# Altium footprint library SamacSys.PcbLib: 16 footprints
Each footprint in its own frame and in the unit in brackets; x right, y up, seen from the top. Pads: shape width x height; smd on the part's side, far side on the other; paste and mask are expansions set on the pad; w line width, h text height; cw(c..) or ccw(c..) is an arc to the next point about the centre after c.
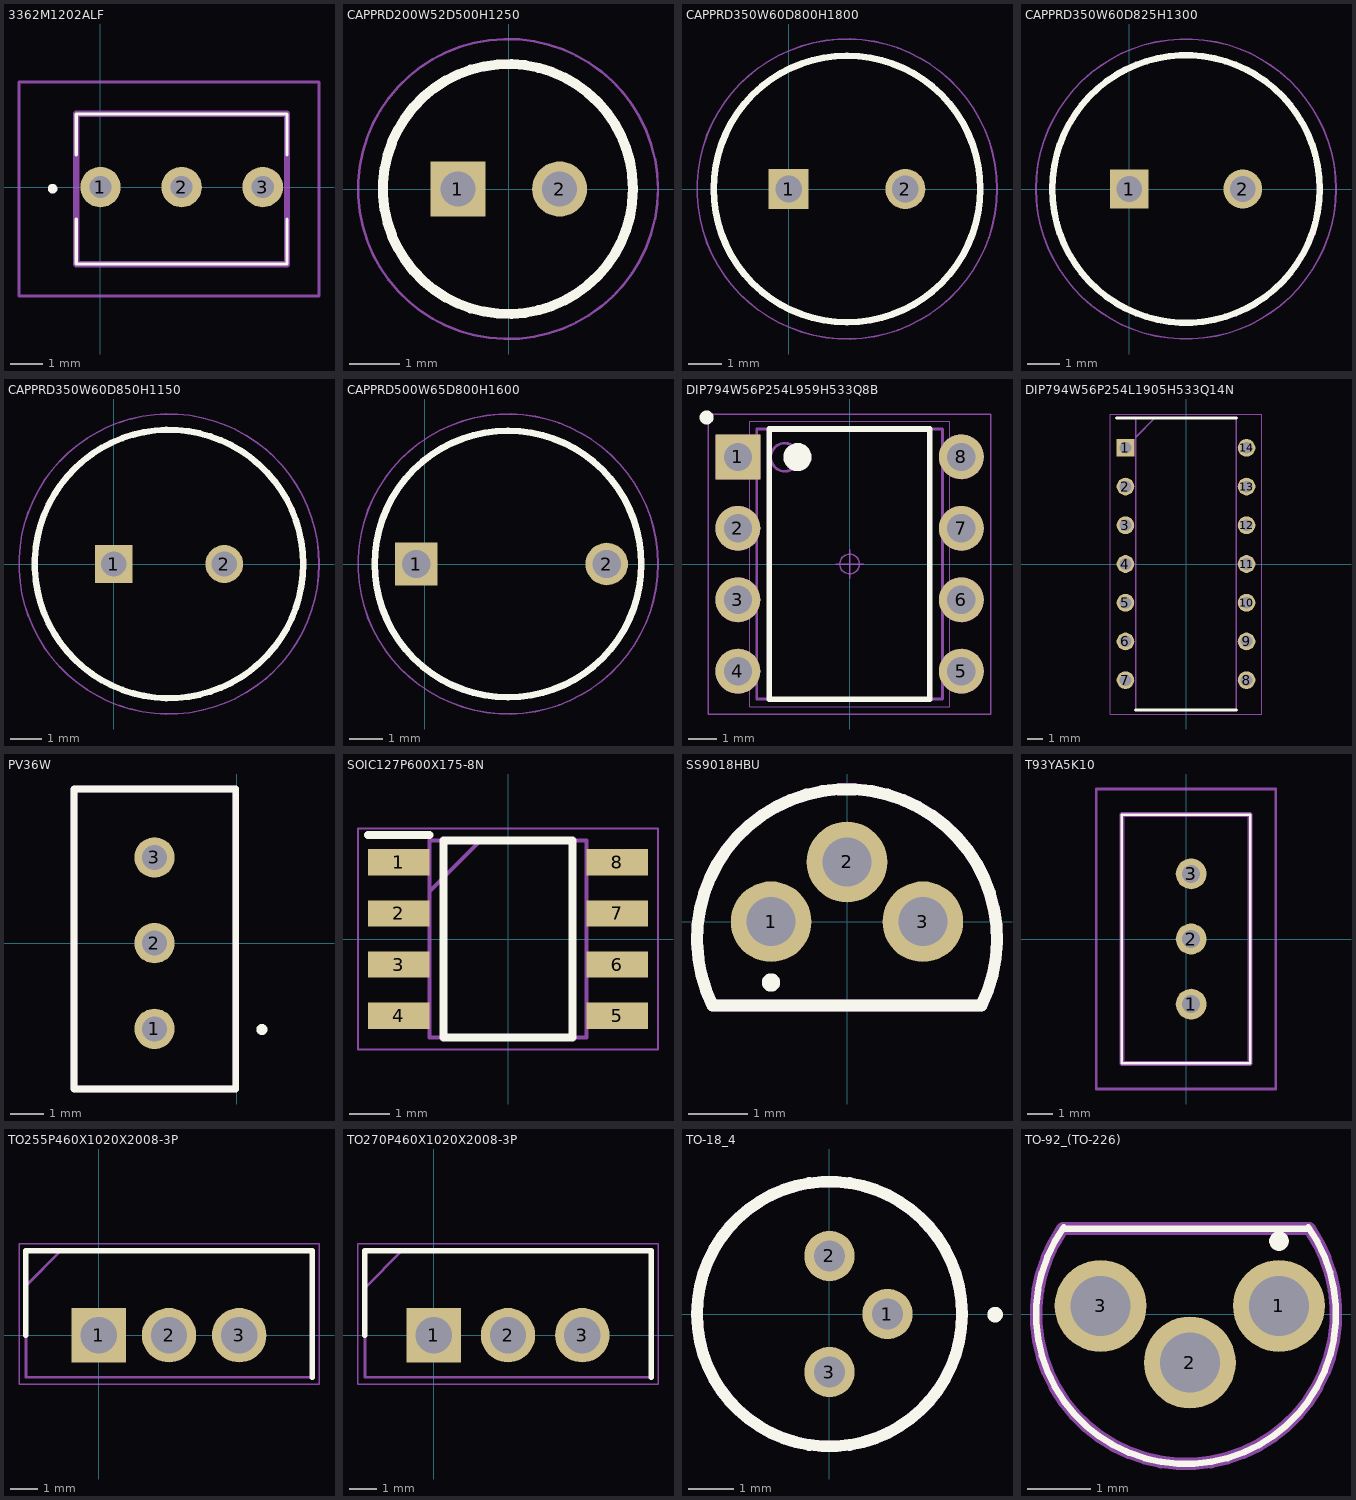
[diagram p0: the footprints below, top view; thin cyan lines are the x and y axes]

## 3362M1202ALF [mm]
pads (3):
  round 1.265 hole 0.69: 1(0,0) 2(2.54,0) 3(5.08,0)
Top Overlay:
  lines w0.1: -0.76,-1 -0.76,-2.41 5.84,-2.41 5.84,-1 ; -0.76,1 -0.76,2.29 5.84,2.29 5.84,1
  lines w0.2: -1.5,-0.1 cw(c-1.5,-0.05) -1.5,0 ; -1.5,-0.1 ccw(c-1.5,-0.05) -1.5,0 ; -1.5,-0.1 cw(c-1.5,-0.05) -1.5,0
Mechanical 13:
  lines w0.2: -0.76,-2.41 5.84,-2.41 5.84,2.29 -0.76,2.29 -0.76,-2.41
Mechanical 15:
  lines w0.1: -2.55,-3.41 6.84,-3.41 6.84,3.29 -2.55,3.29 -2.55,-3.41
3D body "3362M-1-202ALF.stp": height 4.8, standoff -5, extent -0.76,-2.41 5.84,2.29

## CAPPRD200W52D500H1250 [mm]
pads (2):
  rect 1.1x1.1 hole 0.7: 1(-1.016,0)
  round 1.1 hole 0.7: 2(1.016,0)
Top Overlay:
  circle w0.2: c-0.016,0 r2.5
Mechanical 13:
  circle w0.1: c-0.016,0 r2.5
Mechanical 15:
  circle w0.05: c-0.016,0 r3
3D body "860010672005.stp": height 12.5, standoff -10, extent -2.766,-2.75 2.734,2.75

## CAPPRD350W60D800H1800 [mm]
pads (2):
  rect 1.2x1.2 hole 0.8: 1(0,0)
  round 1.2 hole 0.8: 2(3.5,0)
Top Overlay:
  circle w0.2: c1.75,0 r4
Mechanical 13:
  circle w0.1: c1.75,0 r4
Mechanical 15:
  circle w0.05: c1.75,0 r4.5
3D body "ESL227M035AG8AA.stp": height 18, standoff -10, extent -2.5,-4.25 6,4.25

## CAPPRD350W60D825H1300 [mm]
pads (2):
  rect 1.2x1.2 hole 0.8: 1(0,0)
  round 1.2 hole 0.8: 2(3.5,0)
Top Overlay:
  circle w0.2: c1.75,0 r4.125
Mechanical 13:
  circle w0.1: c1.75,0 r4.125
Mechanical 15:
  circle w0.05: c1.75,0 r4.625
3D body "ESMG500ELL101MHB5D.stp": height 13, standoff -10, extent -2.5,-4.25 6,4.25

## CAPPRD350W60D850H1150 [mm]
pads (2):
  rect 1.2x1.2 hole 0.8: 1(0,0)
  round 1.2 hole 0.8: 2(3.5,0)
Top Overlay:
  circle w0.2: c1.75,0 r4.25
Mechanical 13:
  circle w0.1: c1.75,0 r4.25
Mechanical 15:
  circle w0.05: c1.75,0 r4.75
3D body "ECA1HM101.stp": height 11.5, standoff -10, extent -2.75,-4.5 6.25,4.5

## CAPPRD500W65D800H1600 [mm]
pads (2):
  rect 1.275x1.275 hole 0.85: 1(-0.254,0)
  round 1.275 hole 0.85: 2(5.461,0)
Top Overlay:
  circle w0.2: c2.5,0 r4
Mechanical 13:
  circle w0.1: c2.5,0 r4
Mechanical 15:
  circle w0.05: c2.5,0 r4.5
3D body "EEU-FC1J101L.stp": height 16, standoff -10, extent -1.75,-4.25 6.75,4.25

## DIP794W56P254L959H533Q8B [mm]
pads (8):
  rect 1.6x1.6 hole 1: 1(-3.97,3.81)
  round 1.6 hole 1: 2(-3.97,1.27) 3(-3.97,-1.27) 4(-3.97,-3.81) 5(3.97,-3.81) 6(3.97,-1.27) 7(3.97,1.27) 8(3.97,3.81)
Top Overlay:
  circle w0.5: c-1.85,3.8 r0.25
  circle w0.25: c-5.08,5.207 r0.125
  lines w0.2: -2.85,-4.8 2.85,-4.8 2.85,4.8 -2.85,4.8 -2.85,-4.8
Mechanical 13:
  circle w0.1: c-2.302,3.795 r0.5
  circle w0.1: c-3.97,1.27 r0.75
  circle w0.1: c-3.97,-1.27 r0.75
  circle w0.1: c-3.97,-3.81 r0.75
  circle w0.1: c3.97,-3.81 r0.75
  circle w0.1: c3.97,-1.27 r0.75
  circle w0.1: c3.97,1.27 r0.75
  circle w0.1: c3.97,3.81 r0.75
  lines w0.1: -4.72,3.06 -4.72,4.56 -3.22,4.56 -3.22,3.06 -4.72,3.06 ; -3.302,-4.795 3.302,-4.795 3.302,4.795 -3.302,4.795 -3.302,-4.795
Mechanical 15:
  circle w0.05: c0,0 r0.35
  lines w0.001: -3.555,-5.08 3.555,-5.08 3.555,5.08 -3.555,5.08 -3.555,-5.08
  lines w0.05: -0.5,0 0.5,0 ; 0,-0.5 0,0.5 ; -5.02,-5.33 5.02,-5.33 5.02,5.33 -5.02,5.33 -5.02,-5.33
3D body "UC3843BNG.stp": height 5.33, standoff -3.5, extent -4.11,-4.795 4.11,4.795

## DIP794W56P254L1905H533Q14N [mm]
pads (14):
  rect 1.159x1.159 hole 0.759: 1(-3.969,7.62)
  round 1.159 hole 0.759: 2(-3.969,5.08) 3(-3.969,2.54) 4(-3.969,0) 5(-3.969,-2.54) 6(-3.969,-5.08) 7(-3.969,-7.62) 8(3.969,-7.62) 9(3.969,-5.08) 10(3.969,-2.54) 11(3.969,0) 12(3.969,2.54) 13(3.969,5.08) 14(3.969,7.62)
Top Overlay:
  lines w0.2: -4.548,9.588 3.302,9.588 ; -3.302,-9.588 3.302,-9.588
Mechanical 13:
  lines w0.1: -3.302,8.318 -2.032,9.588 ; -3.302,-9.588 3.302,-9.588 3.302,9.588 -3.302,9.588 -3.302,-9.588
Mechanical 15:
  lines w0.05: -4.957,-9.838 4.957,-9.838 4.957,9.838 -4.957,9.838 -4.957,-9.838
3D body "LMC6484IN.stp": height 5.33, standoff -3.5, extent -4.109,-9.525 4.109,9.525

## PV36W [mm]
pads (3):
  round 1.2 hole 0.74: 1(-2.441,-2.54) 2(-2.441,0) 3(-2.441,2.54)
Top Overlay:
  circle w0.2: c0.743,-2.561 r0.065
  lines w0.2: -4.83,-4.324 -0.031,-4.324 -0.031,4.57 -4.83,4.57 -4.83,-4.324
Mechanical 13:
  lines w0.2: -4.83,-4.324 -4.83,4.57 -0.031,4.57 -0.031,-4.324 -4.83,-4.324

## SOIC127P600X175-8N [mm]
pads (8):
  rect 1.525x0.65 smd: 1(-2.712,1.905) 2(-2.712,0.635) 3(-2.712,-0.635) 4(-2.712,-1.905) 5(2.712,-1.905) 6(2.712,-0.635) 7(2.712,0.635) 8(2.712,1.905)
Top Overlay:
  lines w0.2: -3.475,2.58 -1.95,2.58 ; -1.6,-2.45 -1.6,2.45 1.6,2.45 1.6,-2.45 -1.6,-2.45
Mechanical 13:
  lines w0.1: -1.95,1.18 -0.68,2.45 ; -1.95,-2.45 -1.95,2.45 1.95,2.45 1.95,-2.45 -1.95,-2.45
Mechanical 15:
  lines w0.05: -3.725,-2.75 -3.725,2.75 3.725,2.75 3.725,-2.75 -3.725,-2.75
3D body "NE555DR.stp": height 1.75, standoff 0, extent -3,-2.45 3,2.45

## SS9018HBU [mm]
pads (3):
  round 1.35 hole 0.82: 1(-1.27,0) 2(0,1) 3(1.27,0)
Top Overlay:
  circle w0.2: c-1.27,-1.016 r0.053
  lines w0.2: -2.25,-1.4 2.25,-1.4 ; -2.25,-1.401 cw(c0,-0.289) 2.251,-1.397
Mechanical 13:
  lines w0.2: -2.25,-1.4 2.25,-1.4 ; -2.25,-1.4 cw(c0,-0.289) 2.25,-1.4

## T93YA5K10 [mm]
pads (3):
  round 1.2 hole 0.7: 1(0.2,-2.54) 2(0.2,0) 3(0.2,2.54)
Top Overlay:
  lines w0.1: -2.5,-4.85 2.5,-4.85 2.5,4.85 -2.5,4.85 -2.5,-4.85
Mechanical 13:
  lines w0.2: -2.5,-4.85 2.5,-4.85 2.5,4.85 -2.5,4.85 -2.5,-4.85
Mechanical 15:
  lines w0.1: -3.5,-5.85 3.5,-5.85 3.5,5.85 -3.5,5.85 -3.5,-5.85
3D body "T93YA203KT20.stp": height 9.1, standoff -5, extent -2.5,-4.85 2.5,4.85

## TO255P460X1020X2008-3P [mm]
pads (3):
  rect 1.98x1.98 hole 1.32: 1(0,0)
  round 1.98 hole 1.32: 2(2.55,0) 3(5.1,0)
Top Overlay:
  lines w0.2: -2.65,0 -2.65,3.07 7.75,3.07 7.75,-1.53
Mechanical 13:
  lines w0.1: -2.65,1.795 -1.375,3.07 ; -2.65,-1.53 -2.65,3.07 7.75,3.07 7.75,-1.53 -2.65,-1.53
Mechanical 15:
  lines w0.05: -2.9,-1.78 -2.9,3.32 8,3.32 8,-1.78 -2.9,-1.78
3D body "L7812CV.stp": height 19.21, standoff -18.2, extent -2.55,-1.53 7.65,3.07

## TO270P460X1020X2008-3P [mm]
pads (3):
  rect 1.98x1.98 hole 1.32: 1(0,0)
  round 1.98 hole 1.32: 2(2.7,0) 3(5.4,0)
Top Overlay:
  lines w0.2: -2.5,0 -2.5,3.07 7.9,3.07 7.9,-1.53
Mechanical 13:
  lines w0.1: -2.5,1.72 -1.15,3.07 ; -2.5,-1.53 7.9,-1.53 7.9,3.07 -2.5,3.07 -2.5,-1.53
Mechanical 15:
  lines w0.05: -2.75,-1.78 8.15,-1.78 8.15,3.32 -2.75,3.32 -2.75,-1.78
3D body "L7824CV.stp": height 19.21, standoff -18.2, extent -2.4,-1.53 7.8,3.07

## TO-18_4 [mm]
pads (3):
  round 1.1 hole 0.68: 1(1.27,0) 2(0,1.27) 3(0,-1.27)
Top Overlay:
  circle w0.254: c0,0 r2.9
  circle w0.254: c3.624,-0.014 r0.043
Mechanical 13:
  circle w0.254: c0,0 r2.9

## TO-92_(TO-226) [mm]
pads (3):
  round 1.44 hole 0.94: 1(-1.143,0.127) 2(-2.54,-0.762) 3(-3.937,0.127)
Top Overlay:
  circle w0.2: c-1.143,1.143 r0.053
  lines w0.1: -4.532,1.338 -0.668,1.338 ; -4.518,1.358 ccw(c-2.6,0) -0.685,1.362
Mechanical 13:
  lines w0.2: -4.532,1.338 ccw(c-2.6,0) -0.668,1.338 ; -4.532,1.338 -0.668,1.338